# Altium integrated library Conectores.IntLib: 108 symbols
Pins are listed as number, name and electrical type; pins without a type are passive.

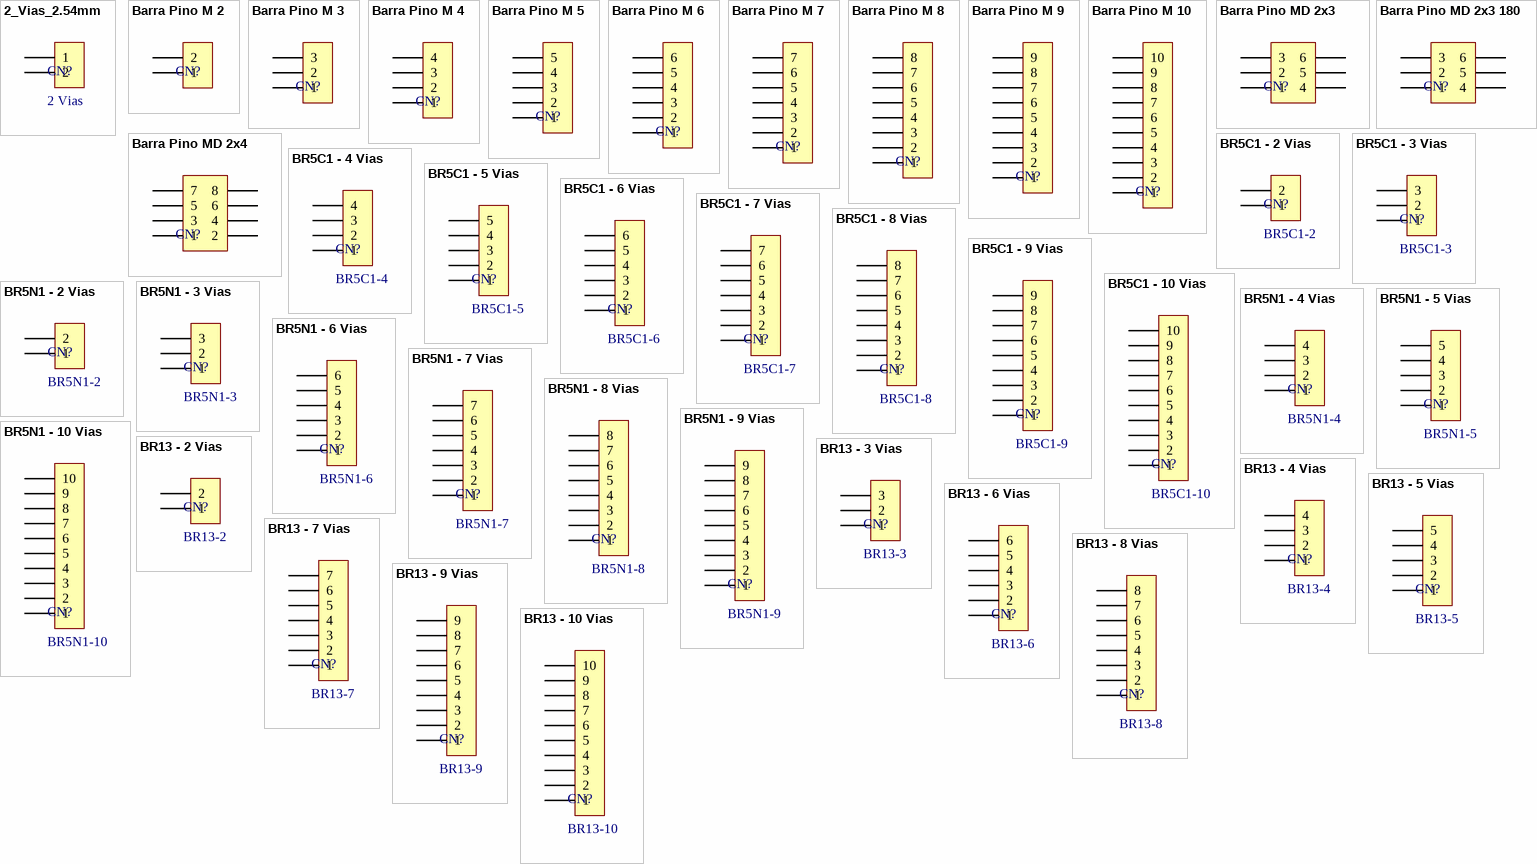
[diagram p0: symbols 2_Vias_2.54mm to BR13 - 10 Vias]

## 2_Vias_2.54mm
designator CN?, comment 2 Vias
Furos 2.54mm Pitch 1mm
footprint 2_Vias_2.54mm
pins: 1, 2

## Barra Pino M 2
designator CN?, comment Header-2  (value not drawn)
Barra Pino Macho 2 Vias 2.54mm
footprint Barra Pino M 2 (Barra Pinos Macho 2 Vias 2.54mm)
pins: 1, 2

## Barra Pino M 3
designator CN?, comment Header-3  (value not drawn)
Barra Pino Macho 3 Vias 2.54mm
footprint Barra Pino M 3 (Barra Pino Macho 3 Vias 2.54mm)
pins: 1, 2, 3

## Barra Pino M 4
designator CN?, comment Header-4  (value not drawn)
Barra Pino Macho 4 Vias 2.54mm
footprint Barra Pino M 4 (Barra Pinos Macho 4 Vias 2.54mm)
pins: 1, 2, 3, 4

## Barra Pino M 5
designator CN?, comment Header-5  (value not drawn)
Barra Pino Macho 5 Vias 2.54mm
footprint Barra Pino M 5 (Barra Pino Macho 5 Vias 2.54mm)
pins: 1, 2, 3, 4, 5

## Barra Pino M 6
designator CN?, comment Header-6  (value not drawn)
Barra Pino Macho 6 Vias 2.54mm
footprint Barra Pino M 6 (Barra Pino Macho 6 Vias 2.54mm)
footprint Barra Pino M 6 90
pins: 1, 2, 3, 4, 5, 6

## Barra Pino M 7
designator CN?, comment Header-7  (value not drawn)
Barra Pino Macho 8 Vias 2.54mm
footprint Barra Pino M 8 (Barra Pino Macho 8 Vias 2.54mm)
pins: 1, 2, 3, 4, 5, 6, 7

## Barra Pino M 8
designator CN?, comment Header-8  (value not drawn)
Barra Pino Macho 8 Vias 2.54mm
footprint Barra Pino M 8 (Barra Pino Macho 8 Vias 2.54mm)
pins: 1, 2, 3, 4, 5, 6, 7, 8

## Barra Pino M 9
designator CN?, comment Header-9  (value not drawn)
Barra Pino Macho 9 Vias 2.54mm
footprint Barra Pino M 10 (Barra Pino Macho 10 Vias 2.54mm)
pins: 1, 2, 3, 4, 5, 6, 7, 8, 9

## Barra Pino M 10
designator CN?, comment Header-10  (value not drawn)
Barra Pino Macho 10 Vias 2.54mm
footprint Barra Pino M 10 (Barra Pino Macho 10 Vias 2.54mm)
pins: 1, 2, 3, 4, 5, 6, 7, 8, 9, 10

## Barra Pino MD 2x3
designator CN?, comment Barra Pinos M 2x3  (value not drawn)
Barra Pino Macho 6 Vias 2.54mm
footprint Barra Pino MD 2x3
pins: 1, 2, 3, 4, 5, 6

## Barra Pino MD 2x3 180
designator CN?, comment Barra Pinos M 2x3  (value not drawn)
Barra Pino Macho 6 Vias 2.54mm
footprint Barra Pino MD 2x3 180 (Barra Pino Macho 3 Vias 2.54mm)
pins: 1, 2, 3, 4, 5, 6

## Barra Pino MD 2x4
designator CN?, comment Barra Pinos M 2x4  (value not drawn)
Barra Pino Macho 8 Vias 2.54mm
footprint Barra Pino MD 2x4 (Barra Pinos Macho 4 Vias 2.54mm)
pins: 1, 2, 3, 4, 5, 6, 7, 8

## BR5C1 - 2 Vias
designator CN?, comment BR5C1-2
Borne de Pressão BR5C1-02 180º Metaltex; Datasheet: http://www.eletrodex.kinghost.net/Loja_Tray/Datasheets/Conectores/Bornes/BR.pdf
footprint BR5C1-02
pins: 1, 2

## BR5C1 - 3 Vias
designator CN?, comment BR5C1-3
Borne de Pressão BR5C1-03 180º Metaltex; Datasheet: http://www.eletrodex.kinghost.net/Loja_Tray/Datasheets/Conectores/Bornes/BR.pdf
footprint BR5C1-03
pins: 1, 2, 3

## BR5C1 - 4 Vias
designator CN?, comment BR5C1-4
Borne de Pressão BR5C1-04 180º Metaltex; Datasheet: http://www.eletrodex.kinghost.net/Loja_Tray/Datasheets/Conectores/Bornes/BR.pdf
footprint BR5C1-04
pins: 1, 2, 3, 4

## BR5C1 - 5 Vias
designator CN?, comment BR5C1-5
Borne de Pressão BR5C1-05 180º Metaltex; Datasheet: http://www.eletrodex.kinghost.net/Loja_Tray/Datasheets/Conectores/Bornes/BR.pdf
footprint BR5C1-05
pins: 1, 2, 3, 4, 5

## BR5C1 - 6 Vias
designator CN?, comment BR5C1-6
Borne de Pressão BR5C1-06 180º Metaltex; Datasheet: http://www.eletrodex.kinghost.net/Loja_Tray/Datasheets/Conectores/Bornes/BR.pdf
footprint BR5C1-06
pins: 1, 2, 3, 4, 5, 6

## BR5C1 - 7 Vias
designator CN?, comment BR5C1-7
Borne de Pressão BR5C1-07 180º Metaltex; Datasheet: http://www.eletrodex.kinghost.net/Loja_Tray/Datasheets/Conectores/Bornes/BR.pdf
footprint BR5C1-07
pins: 1, 2, 3, 4, 5, 6, 7

## BR5C1 - 8 Vias
designator CN?, comment BR5C1-8
Borne de Pressão BR5C1-08 180º Metaltex; Datasheet: http://www.eletrodex.kinghost.net/Loja_Tray/Datasheets/Conectores/Bornes/BR.pdf
footprint BR5C1-08
pins: 1, 2, 3, 4, 5, 6, 7, 8

## BR5C1 - 9 Vias
designator CN?, comment BR5C1-9
Borne de Pressão BR5C1-09 180º Metaltex; Datasheet: http://www.eletrodex.kinghost.net/Loja_Tray/Datasheets/Conectores/Bornes/BR.pdf
footprint BR5C1-09
pins: 1, 2, 3, 4, 5, 6, 7, 8, 9

## BR5C1 - 10 Vias
designator CN?, comment BR5C1-10
Borne de Pressão BR5C1-10 180º Metaltex; Datasheet: http://www.eletrodex.kinghost.net/Loja_Tray/Datasheets/Conectores/Bornes/BR.pdf
footprint BR5C1-10
pins: 1, 2, 3, 4, 5, 6, 7, 8, 9, 10

## BR5N1 - 2 Vias
designator CN?, comment BR5N1-2
Borne de Pressão BR5N1-02 90º Metaltex; Datasheet: http://www.eletrodex.kinghost.net/Loja_Tray/Datasheets/Conectores/Bornes/BR.pdf
footprint BR5N1-02
pins: 1, 2

## BR5N1 - 3 Vias
designator CN?, comment BR5N1-3
Borne de Pressão BR5N1-03 90º Metaltex; Datasheet: http://www.eletrodex.kinghost.net/Loja_Tray/Datasheets/Conectores/Bornes/BR.pdf
footprint BR5N1-03
pins: 1, 2, 3

## BR5N1 - 4 Vias
designator CN?, comment BR5N1-4
Borne de Pressão BR5N1-04 90º Metaltex; Datasheet: http://www.eletrodex.kinghost.net/Loja_Tray/Datasheets/Conectores/Bornes/BR.pdf
footprint BR5N1-04
pins: 1, 2, 3, 4

## BR5N1 - 5 Vias
designator CN?, comment BR5N1-5
Borne de Pressão BR5N1-05 90º Metaltex; Datasheet: http://www.eletrodex.kinghost.net/Loja_Tray/Datasheets/Conectores/Bornes/BR.pdf
footprint BR5N1-05
pins: 1, 2, 3, 4, 5

## BR5N1 - 6 Vias
designator CN?, comment BR5N1-6
Borne de Pressão BR5N1-06 90º Metaltex; Datasheet: http://www.eletrodex.kinghost.net/Loja_Tray/Datasheets/Conectores/Bornes/BR.pdf
footprint BR5N1-06
pins: 1, 2, 3, 4, 5, 6

## BR5N1 - 7 Vias
designator CN?, comment BR5N1-7
Borne de Pressão BR5N1-07 90º Metaltex; Datasheet: http://www.eletrodex.kinghost.net/Loja_Tray/Datasheets/Conectores/Bornes/BR.pdf
footprint BR5N1-07
pins: 1, 2, 3, 4, 5, 6, 7

## BR5N1 - 8 Vias
designator CN?, comment BR5N1-8
Borne de Pressão BR5N1-08 90º Metaltex; Datasheet: http://www.eletrodex.kinghost.net/Loja_Tray/Datasheets/Conectores/Bornes/BR.pdf
footprint BR5N1-08
pins: 1, 2, 3, 4, 5, 6, 7, 8

## BR5N1 - 9 Vias
designator CN?, comment BR5N1-9
Borne de Pressão BR5N1-09 90º Metaltex; Datasheet: http://www.eletrodex.kinghost.net/Loja_Tray/Datasheets/Conectores/Bornes/BR.pdf
footprint BR5N1-09
pins: 1, 2, 3, 4, 5, 6, 7, 8, 9

## BR5N1 - 10 Vias
designator CN?, comment BR5N1-10
Borne de Pressão BR5N1-10 90º Metaltex; Datasheet: http://www.eletrodex.kinghost.net/Loja_Tray/Datasheets/Conectores/Bornes/BR.pdf
footprint BR5N1-10
pins: 1, 2, 3, 4, 5, 6, 7, 8, 9, 10

## BR13 - 2 Vias
designator CN?, comment BR13-2
Borne de Mola Metaltex - Passo 3.5mm; Datasheet: http://www.eletrodex.kinghost.net/Loja_Tray/Datasheets/Conectores/Bornes/BR.pdf
footprint BR13-2
pins: 1, 2

## BR13 - 3 Vias
designator CN?, comment BR13-3
Borne de Mola Metaltex - Passo 3.5mm; Datasheet: http://www.eletrodex.kinghost.net/Loja_Tray/Datasheets/Conectores/Bornes/BR.pdf
footprint BR13-3
pins: 1, 2, 3

## BR13 - 4 Vias
designator CN?, comment BR13-4
Borne de Mola Metaltex - Passo 3.5mm; Datasheet: http://www.eletrodex.kinghost.net/Loja_Tray/Datasheets/Conectores/Bornes/BR.pdf
footprint BR13-4
pins: 1, 2, 3, 4

## BR13 - 5 Vias
designator CN?, comment BR13-5
Borne de Mola Metaltex - Passo 3.5mm; Datasheet: http://www.eletrodex.kinghost.net/Loja_Tray/Datasheets/Conectores/Bornes/BR.pdf
footprint BR13-5
pins: 1, 2, 3, 4, 5

## BR13 - 6 Vias
designator CN?, comment BR13-6
Borne de Mola Metaltex - Passo 3.5mm; Datasheet: http://www.eletrodex.kinghost.net/Loja_Tray/Datasheets/Conectores/Bornes/BR.pdf
footprint BR13-6
pins: 1, 2, 3, 4, 5, 6

## BR13 - 7 Vias
designator CN?, comment BR13-7
Borne de Mola Metaltex - Passo 3.5mm; Datasheet: http://www.eletrodex.kinghost.net/Loja_Tray/Datasheets/Conectores/Bornes/BR.pdf
footprint BR13-7
pins: 1, 2, 3, 4, 5, 6, 7

## BR13 - 8 Vias
designator CN?, comment BR13-8
Borne de Mola Metaltex - Passo 3.5mm; Datasheet: http://www.eletrodex.kinghost.net/Loja_Tray/Datasheets/Conectores/Bornes/BR.pdf
footprint BR13-8
pins: 1, 2, 3, 4, 5, 6, 7, 8

## BR13 - 9 Vias
designator CN?, comment BR13-9
Borne de Mola Metaltex - Passo 3.5mm; Datasheet: http://www.eletrodex.kinghost.net/Loja_Tray/Datasheets/Conectores/Bornes/BR.pdf
footprint BR13-9
pins: 1, 2, 3, 4, 5, 6, 7, 8, 9

## BR13 - 10 Vias
designator CN?, comment BR13-10
Borne de Mola Metaltex - Passo 3.5mm; Datasheet: http://www.eletrodex.kinghost.net/Loja_Tray/Datasheets/Conectores/Bornes/BR.pdf
footprint BR13-10
pins: 1, 2, 3, 4, 5, 6, 7, 8, 9, 10

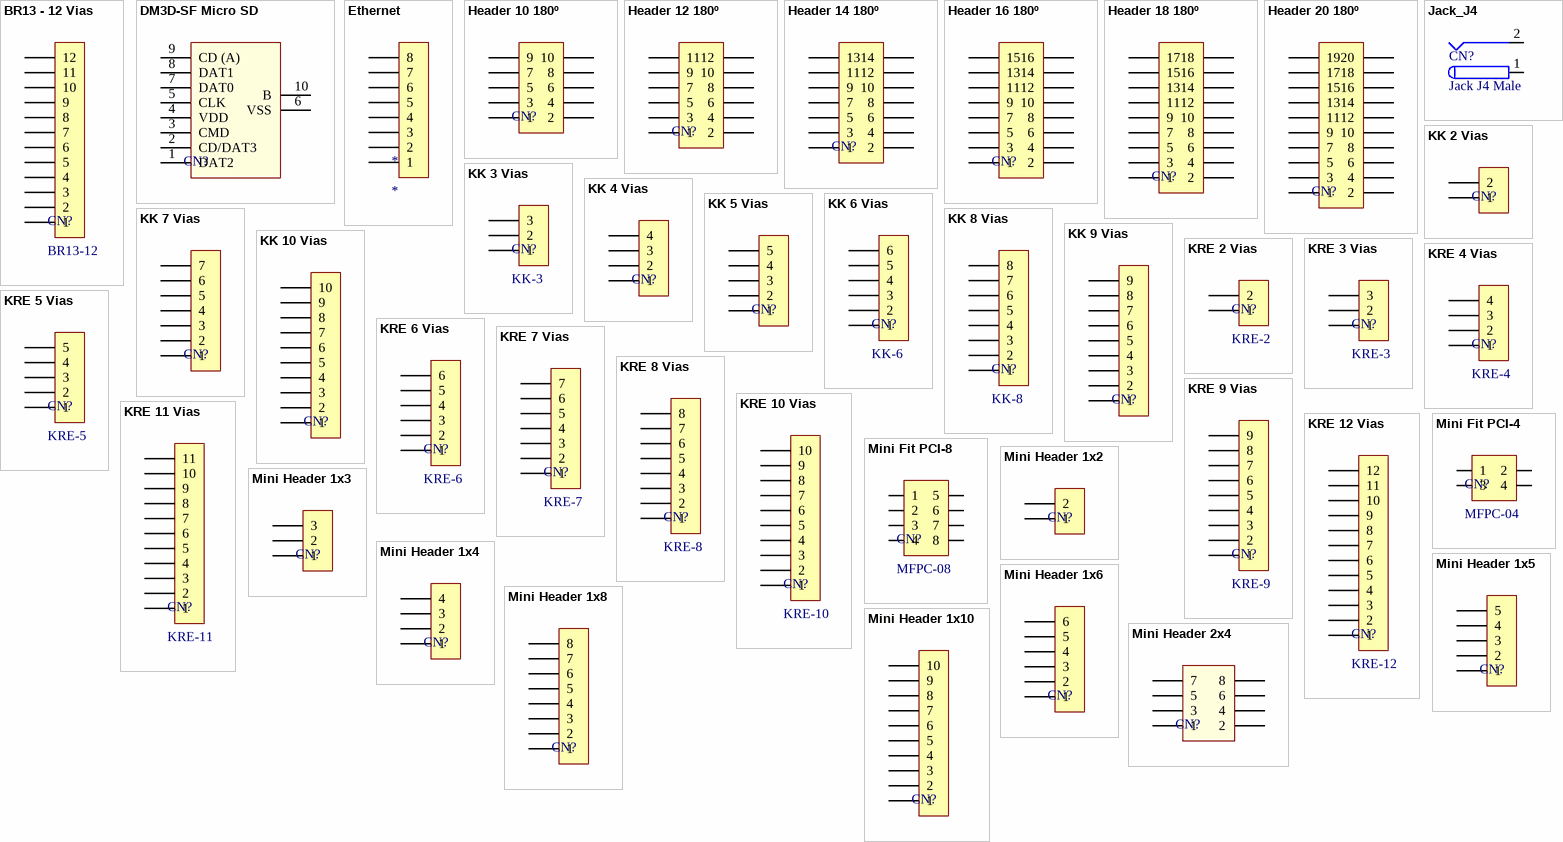
[diagram p1: symbols BR13 - 12 Vias to Mini Header 2x4]

## BR13 - 12 Vias
designator CN?, comment BR13-12
Borne de Mola Metaltex - Passo 3.5mm; Datasheet: http://www.eletrodex.kinghost.net/Loja_Tray/Datasheets/Conectores/Bornes/BR.pdf
footprint BR13-12
pins: 1, 2, 3, 4, 5, 6, 7, 8, 9, 10, 11, 12

## DM3D-SF Micro SD
designator CN?, comment DM3D-SF  (value not drawn)
Conector Micro SD Card
footprint DM3D-SF
pins: 1 DAT2, 2 CD/DAT3, 3 CMD, 4 VDD, 5 CLK, 6 VSS, 7 DAT0, 8 DAT1, 9 CD (A), 10 B

## Ethernet
designator *
pins: 1, 2, 3, 4, 5, 6, 7, 8

## Header 10 180º
designator CN?, comment Header 10 Vias  (value not drawn)
Conector Placa Macho 12 Vias C/ guia 180º 2.54mm
footprint Header 10 180º PCI
pins: 1, 2, 3, 4, 5, 6, 7, 8, 9, 10

## Header 12 180º
designator CN?, comment Header 12 Vias  (value not drawn)
Conector Placa Macho 12 Vias C/ guia 180º 2.54mm
footprint Header 12 180º PCI
pins: 1, 2, 3, 4, 5, 6, 7, 8, 9, 10, 11, 12

## Header 14 180º
designator CN?, comment Header 14 Vias  (value not drawn)
Conector Placa Macho 14 Vias C/ guia 180º 2.54mm
footprint Header 14 180º PCI
pins: 1, 2, 3, 4, 5, 6, 7, 8, 9, 10, 11, 12, 13, 14

## Header 16 180º
designator CN?, comment Header 16 Vias  (value not drawn)
Conector Placa Macho 16 Vias C/ guia 180º 2.54mm
footprint Header 16 180º PCI
pins: 1, 2, 3, 4, 5, 6, 7, 8, 9, 10, 11, 12, 13, 14, 15, 16

## Header 18 180º
designator CN?, comment Header 18 Vias  (value not drawn)
Conector Placa Macho 18 Vias C/ guia 180º 2.54mm
footprint Header 18 180º PCI
pins: 1, 2, 3, 4, 5, 6, 7, 8, 9, 10, 11, 12, 13, 14, 15, 16, 17, 18

## Header 20 180º
designator CN?, comment Header 20 Vias  (value not drawn)
Conector Placa Macho 20 Vias C/ guia 180º 2.54mm
footprint Header 20 180º PCI
pins: 1, 2, 3, 4, 5, 6, 7, 8, 9, 10, 11, 12, 13, 14, 15, 16, 17, 18, 19, 20

## Jack_J4
designator CN?, comment Jack J4 Male
Conector Plug Jack J4 (padrao arduino)
footprint Jack J4
pins: 1 (power), 2 (power)

## KK 2 Vias
designator CN?, comment KK-2  (value not drawn)
Conector Placa KK 2 Vias 2.54mm
footprint KK_2W_.100
pins: 1, 2

## KK 3 Vias
designator CN?, comment KK-3
Conector Placa KK 3 Vias 2.54mm
footprint KK_3W_.100
pins: 1, 2, 3

## KK 4 Vias
designator CN?, comment KK-4  (value not drawn)
Conector Placa KK 4 Vias 2.54mm
footprint KK_4W_.100
pins: 1, 2, 3, 4

## KK 5 Vias
designator CN?, comment KK-5  (value not drawn)
Conector Placa KK 5 Vias 2.54mm
footprint KK_5W_.100
pins: 1, 2, 3, 4, 5

## KK 6 Vias
designator CN?, comment KK-6
Conector Placa KK 6 Vias 2.54mm
footprint KK_6W_.100
pins: 1, 2, 3, 4, 5, 6

## KK 7 Vias
designator CN?, comment KK-7  (value not drawn)
Conector Placa KK 7 Vias 2.54mm
footprint KK_7W_.100
pins: 1, 2, 3, 4, 5, 6, 7

## KK 8 Vias
designator CN?, comment KK-8
Conector Placa KK 8 Vias 2.54mm
footprint KK_8W_.100
pins: 1, 2, 3, 4, 5, 6, 7, 8

## KK 9 Vias
designator CN?, comment KK-9  (value not drawn)
Conector Placa KK 9 Vias 2.54mm
footprint KK_9W_.100
pins: 1, 2, 3, 4, 5, 6, 7, 8, 9

## KK 10 Vias
designator CN?, comment KK-10  (value not drawn)
Conector Placa KK 10 Vias 2.54mm
footprint KK_10W_.100
pins: 1, 2, 3, 4, 5, 6, 7, 8, 9, 10

## KRE 2 Vias
designator CN?, comment KRE-2
BR4 - BORNE KRE METALTEX 14MM VERDE; Datasheet: http://www.eletrodex.kinghost.net/Loja_Tray/Datasheets/Conectores/Bornes/BR.pdf
footprint KRE 2 Vias 5mm (Terminal Block 2 Pos. 5.08mm Pitch)
pins: 1, 2

## KRE 3 Vias
designator CN?, comment KRE-3
BR4 - BORNE KRE METALTEX 14MM VERDE; Datasheet: http://www.eletrodex.kinghost.net/Loja_Tray/Datasheets/Conectores/Bornes/BR.pdf
footprint KRE 3 Vias 5mm (Terminal Block 3 Pos. 5mm Pitch)
pins: 1, 2, 3

## KRE 4 Vias
designator CN?, comment KRE-4
BR4 - BORNE KRE METALTEX 14MM VERDE; Datasheet: http://www.eletrodex.kinghost.net/Loja_Tray/Datasheets/Conectores/Bornes/BR.pdf
footprint KRE 4 Vias 5mm (Terminal Block 4 Pos. 5mm Pitch)
pins: 1, 2, 3, 4

## KRE 5 Vias
designator CN?, comment KRE-5
BR4 - BORNE KRE METALTEX 14MM VERDE; Datasheet: http://www.eletrodex.kinghost.net/Loja_Tray/Datasheets/Conectores/Bornes/BR.pdf
footprint KRE 5 Vias 5mm (Terminal Block 5 Pos. 5mm Pitch)
pins: 1, 2, 3, 4, 5

## KRE 6 Vias
designator CN?, comment KRE-6
BR4 - BORNE KRE METALTEX 14MM VERDE; Datasheet: http://www.eletrodex.kinghost.net/Loja_Tray/Datasheets/Conectores/Bornes/BR.pdf
footprint KRE 6 Vias 5mm (Terminal Block 6 Pos. 5mm Pitch)
pins: 1, 2, 3, 4, 5, 6

## KRE 7 Vias
designator CN?, comment KRE-7
BR4 - BORNE KRE METALTEX 14MM VERDE; Datasheet: http://www.eletrodex.kinghost.net/Loja_Tray/Datasheets/Conectores/Bornes/BR.pdf
footprint KRE 7 Vias 5mm (Terminal Block 7 Pos. 5mm Pitch)
pins: 1, 2, 3, 4, 5, 6, 7

## KRE 8 Vias
designator CN?, comment KRE-8
BR4 - BORNE KRE METALTEX 14MM VERDE; Datasheet: http://www.eletrodex.kinghost.net/Loja_Tray/Datasheets/Conectores/Bornes/BR.pdf
footprint KRE 8 Vias 5mm (Terminal Block 8 Pos. 5mm Pitch)
pins: 1, 2, 3, 4, 5, 6, 7, 8

## KRE 9 Vias
designator CN?, comment KRE-9
BR4 - BORNE KRE METALTEX 14MM VERDE; Datasheet: http://www.eletrodex.kinghost.net/Loja_Tray/Datasheets/Conectores/Bornes/BR.pdf
footprint KRE 9 Vias 5mm (Terminal Block 9 Pos. 5mm Pitch)
pins: 1, 2, 3, 4, 5, 6, 7, 8, 9

## KRE 10 Vias
designator CN?, comment KRE-10
BR4 - BORNE KRE METALTEX 14MM VERDE; Datasheet: http://www.eletrodex.kinghost.net/Loja_Tray/Datasheets/Conectores/Bornes/BR.pdf
footprint KRE 10 Vias 5mm (Terminal Block 10 Pos. 5mm Pitch)
pins: 1, 2, 3, 4, 5, 6, 7, 8, 9, 10

## KRE 11 Vias
designator CN?, comment KRE-11
BR4 - BORNE KRE METALTEX 14MM VERDE; Datasheet: http://www.eletrodex.kinghost.net/Loja_Tray/Datasheets/Conectores/Bornes/BR.pdf
footprint KRE 11 Vias 5mm (Terminal Block 11 Pos. 5mm Pitch)
pins: 1, 2, 3, 4, 5, 6, 7, 8, 9, 10, 11

## KRE 12 Vias
designator CN?, comment KRE-12
BR4 - BORNE KRE METALTEX 14MM VERDE; Datasheet: http://www.eletrodex.kinghost.net/Loja_Tray/Datasheets/Conectores/Bornes/BR.pdf
footprint KRE 12 Vias 5mm (Terminal Block 12 Pos. 5mm Pitch)
pins: 1, 2, 3, 4, 5, 6, 7, 8, 9, 10, 11, 12

## Mini Fit PCI-4
designator CN?, comment MFPC-04
Conector Macho para PCI 4 vias 4.2mm
footprint MFPC-04
pins: 1, 2, 3, 4

## Mini Fit PCI-8
designator CN?, comment MFPC-08
Conector Macho para PCI 8 vias 4.2mm
footprint MFPC-08
pins: 1, 2, 3, 4, 5, 6, 7, 8

## Mini Header 1x2
designator CN?  (value not drawn)
Barra Pino Femea 2 Vias 2.54mm; Partnumber: MCS-02
footprint Mini Header 1x2 (Barra Pinos Femea 2 Vias 2.54mm)
pins: 1, 2

## Mini Header 1x3
designator CN?  (value not drawn)
Barra Pino Femea 3 Vias 2.54mm; Partnumber: MCS-03
footprint Mini Header 1x3 (MCS-03)
pins: 1, 2, 3

## Mini Header 1x4
designator CN?  (value not drawn)
Barra Pino Femea 4 Vias 2.54mm; Partnumber: MCS-04
footprint Mini Header 1x4 (MCS-04)
pins: 1, 2, 3, 4

## Mini Header 1x5
designator CN?  (value not drawn)
Barra Pino Femea 5 Vias 2.54mm; Partnumber: MCS-05
footprint Mini Header 1x5 (MCS-05)
pins: 1, 2, 3, 4, 5

## Mini Header 1x6
designator CN?  (value not drawn)
Barra Pino Femea 6 Vias 2.54mm; Partnumber: MCS-06
footprint Mini Header 1x6 (MCS-06)
pins: 1, 2, 3, 4, 5, 6

## Mini Header 1x8
designator CN?  (value not drawn)
Barra Pino Femea 8 Vias 2.54mm; Partnumber: MCS-08
footprint Mini Header 1x8 (MCS-08)
pins: 1, 2, 3, 4, 5, 6, 7, 8

## Mini Header 1x10
designator CN?  (value not drawn)
Barra Pino Femea 10 Vias 2.54mm; Partnumber: MCS-10
footprint Mini Header 1x10 (MCS-10)
pins: 1, 2, 3, 4, 5, 6, 7, 8, 9, 10

## Mini Header 2x4
designator CN?  (value not drawn)
Barra Pino Femea 2x4 Vias 2.54mm; Partnumber: MCD-04
footprint Mini Header 2x4 (MCD-04)
pins: 1, 2, 3, 4, 5, 6, 7, 8

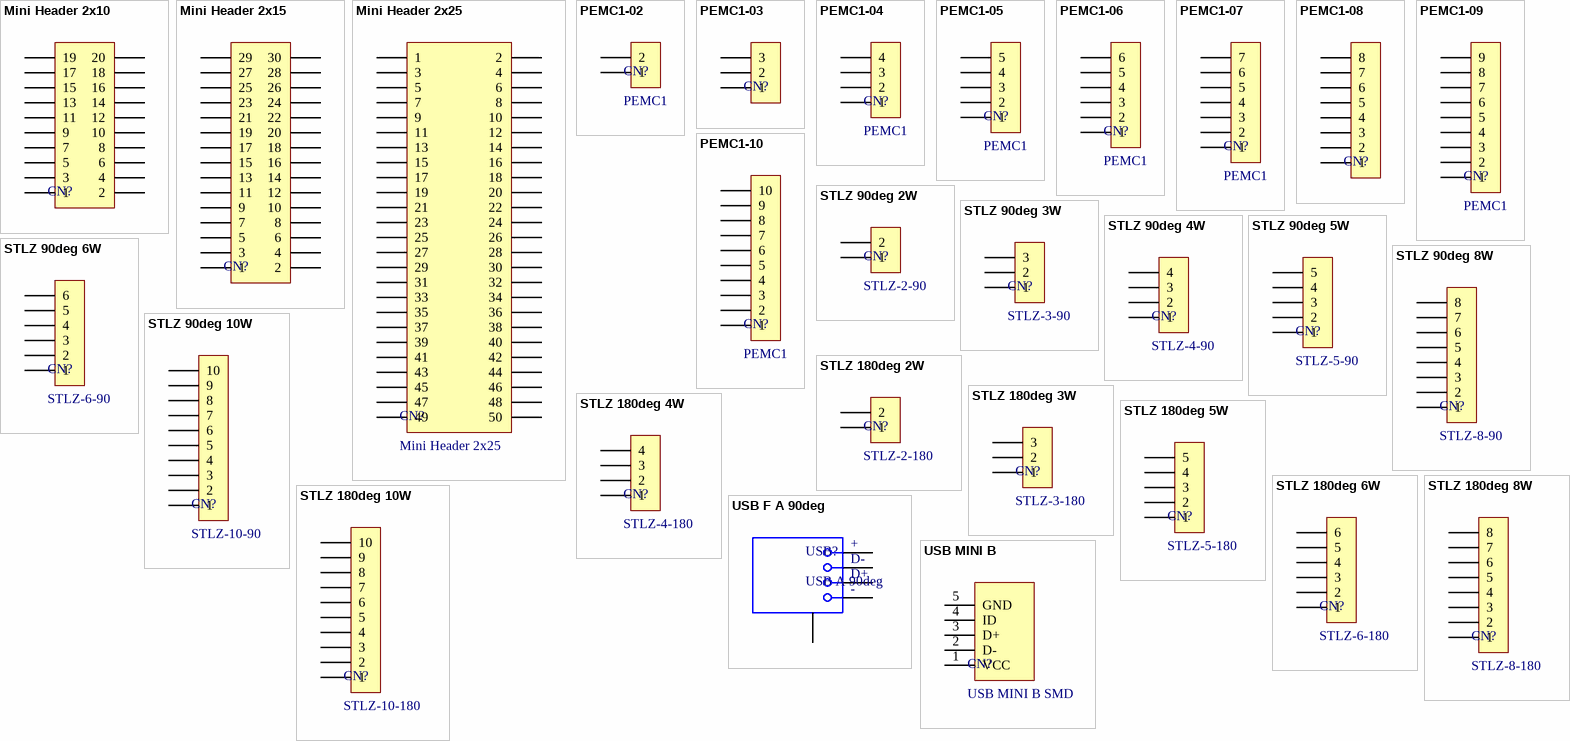
[diagram p2: symbols Mini Header 2x10 to USB MINI B]

## Mini Header 2x10
designator CN?  (value not drawn)
Barra Pino Femea 2x10 Vias 2.54mm; Partnumber: MCD-10
footprint Mini Header 2x10 (MCD-10)
pins: 1, 2, 3, 4, 5, 6, 7, 8, 9, 10, 11, 12, 13, 14, 15, 16, 17, 18, 19, 20

## Mini Header 2x15
designator CN?  (value not drawn)
Barra Pino Femea 2x15 Vias 2.54mm; Partnumber: MCD-15
footprint Mini Header 2x15 (MCD-15)
pins: 1, 2, 3, 4, 5, 6, 7, 8, 9, 10, 11, 12, 13, 14, 15, 16, 17, 18, 19, 20, 21, 22, 23, 24, 25, 26, 27, 28, 29, 30

## Mini Header 2x25
designator CN?
Mini Header Femea 2x25 Vias 2.54mm; Partnumber: MCD-25
footprint Mini Header 2X25 (MCD-25)
pins: 1, 2, 3, 4, 5, 6, 7, 8, 9, 10, 11, 12, 13, 14, 15, 16, 17, 18, 19, 20, 21, 22, 23, 24, 25, 26, 27, 28, 29, 30, 31, 32, 33, 34, 35, 36, 37, 38, 39, 40, 41, 42, 43, 44, 45, 46, 47, 48, 49, 50

## PEMC1-02
designator CN?, comment PEMC1
Conector Placa PEMC1 3 Vias passo 2.50mm; Datasheet: http://www.eletrodex.kinghost.net/Loja_Tray/Datasheets/Conectores/PCI/PE.pdf
footprint PEMC1-02
pins: 1, 2

## PEMC1-03
designator CN?, comment PEMC1  (value not drawn)
Conector Placa PEMC1 3 Vias passo 2.50mm; Datasheet: http://www.eletrodex.kinghost.net/Loja_Tray/Datasheets/Conectores/PCI/PE.pdf
footprint PEMC1-03
pins: 1, 2, 3

## PEMC1-04
designator CN?, comment PEMC1
Conector Placa PEMC1 4 Vias passo 2.50mm; Datasheet: http://www.eletrodex.kinghost.net/Loja_Tray/Datasheets/Conectores/PCI/PE.pdf
footprint PEMC1-04
pins: 1, 2, 3, 4

## PEMC1-05
designator CN?, comment PEMC1
Conector Placa PEMC1 5 Vias passo 2.50mm; Datasheet: http://www.eletrodex.kinghost.net/Loja_Tray/Datasheets/Conectores/PCI/PE.pdf
footprint PEMC1-05
pins: 1, 2, 3, 4, 5

## PEMC1-06
designator CN?, comment PEMC1
Conector Placa PEMC1 6 Vias passo 2.50mm; Datasheet: http://www.eletrodex.kinghost.net/Loja_Tray/Datasheets/Conectores/PCI/PE.pdf
footprint PEMC1-06
pins: 1, 2, 3, 4, 5, 6

## PEMC1-07
designator CN?, comment PEMC1
Conector Placa PEMC1 7 Vias passo 2.50mm; Datasheet: http://www.eletrodex.kinghost.net/Loja_Tray/Datasheets/Conectores/PCI/PE.pdf
footprint PEMC1-07
pins: 1, 2, 3, 4, 5, 6, 7

## PEMC1-08
designator CN?, comment PEMC1  (value not drawn)
Conector Placa PEMC1 8 Vias passo 2.50mm; Datasheet: http://www.eletrodex.kinghost.net/Loja_Tray/Datasheets/Conectores/PCI/PE.pdf
footprint PEMC1-08
pins: 1, 2, 3, 4, 5, 6, 7, 8

## PEMC1-09
designator CN?, comment PEMC1
Conector Placa PEMC1 9 Vias passo 2.50mm; Datasheet: http://www.eletrodex.kinghost.net/Loja_Tray/Datasheets/Conectores/PCI/PE.pdf
footprint PEMC1-09
pins: 1, 2, 3, 4, 5, 6, 7, 8, 9

## PEMC1-10
designator CN?, comment PEMC1
Conector Placa PEMC1 10 Vias passo 2.50mm; Datasheet: http://www.eletrodex.kinghost.net/Loja_Tray/Datasheets/Conectores/PCI/PE.pdf
footprint PEMC1-10
pins: 1, 2, 3, 4, 5, 6, 7, 8, 9, 10

## STLZ 90deg 2W
designator CN?, comment STLZ-2-90
Conector Socket STLZ 2 Vias 5.08mm 90deg; Partnumber: 1757242; Supplier Code: MSTBA 2,5/ 2-G-5,08; Supplier: https://www.digikey.com.br/pt/products/detail/phoenix-contact/1755736/260518
footprint STLZ 2 90deg 5.08mm (Socket STLZ 2 Pos. 5.08mm Pitch)
pins: 1, 2

## STLZ 90deg 3W
designator CN?, comment STLZ-3-90
Conector Socket STLZ 3 Vias 5.08mm 90deg; Partnumber: 1757255; Supplier Code: MSTBA 2,5/ 3-G-5,08; Supplier: https://www.digikey.com.br/pt/products/detail/phoenix-contact/1757255/260475?s=N4IgTCBcDaIIwHYCsCxKSAugXyA
footprint STLZ 3 90deg 5.08mm (Socket STLZ 3 Pos. 5.08mm Pitch)
pins: 1, 2, 3

## STLZ 90deg 4W
designator CN?, comment STLZ-4-90
Conector Socket STLZ 4 Vias 5.08mm 90deg; Partnumber: 1757268; Supplier Code: MSTBA 2,5/ 4-G-5,08; Supplier: https://www.digikey.com.br/pt/products/detail/phoenix-contact/1757268/260476
footprint STLZ 4 90deg 5.08mm (Socket STLZ 4 Pos. 5.08mm Pitch)
pins: 1, 2, 3, 4

## STLZ 90deg 5W
designator CN?, comment STLZ-5-90
Conector Socket STLZ 5 Vias 5.08mm 90deg; Partnumber: 1757271; Supplier Code: MSTBA 2,5/ 5-G-5,08; Supplier: https://www.digikey.com.br/pt/products/detail/phoenix-contact/1757271/260477?s=N4IgTCBcDaIIwHYCsCwLiAugXyA
footprint STLZ 5 90deg 5.08mm (Socket STLZ 5 Pos. 5.08mm Pitch)
pins: 1, 2, 3, 4, 5

## STLZ 90deg 6W
designator CN?, comment STLZ-6-90
Conector Socket STLZ 6 Vias 5.08mm 90deg; Partnumber: 1757284; Supplier Code: MSTBA 2,5/ 6-G-5,08; Supplier: https://www.digikey.com.br/pt/products/detail/phoenix-contact/1757284/260478?s=N4IgTCBcDaIIwHYCsCwA4AsIC6BfIA
footprint STLZ 6 90deg 5.08mm (Socket STLZ 6 Pos. 5.08mm Pitch)
pins: 1, 2, 3, 4, 5, 6

## STLZ 90deg 8W
designator CN?, comment STLZ-8-90
Conector Socket STLZ 8 Vias 5.08mm 90deg; Partnumber: 1757307; Supplier Code: MSTBA 2,5/ 8-G-5,08; Supplier: https://www.digikey.com.br/pt/products/detail/phoenix-contact/1757307/260480?s=N4IgTCBcDaIIwHYCsCDMAGBIC6BfIA
footprint STLZ 8 90deg 5.08mm (Socket STLZ 8 Pos. 5.08mm Pitch)
pins: 1, 2, 3, 4, 5, 6, 7, 8

## STLZ 90deg 10W
designator CN?, comment STLZ-10-90
Conector Socket STLZ 10 Vias 5.08mm 90deg; Partnumber: 1757323; Supplier Code: MSTBA 2,5/ 10-G-5,08; Supplier: https://www.digikey.com.br/pt/products/detail/phoenix-contact/1757323/260482?s=N4IgTCBcDaIIwHYCsCDMZUgLoF8g
footprint STLZ 10 90deg 5.08mm (Socket STLZ 10 Pos. 5.08mm Pitch)
pins: 1, 2, 3, 4, 5, 6, 7, 8, 9, 10

## STLZ 180deg 2W
designator CN?, comment STLZ-2-180
Conector Socket STLZ 2 Vias 5.08mm 180deg; Partnumber: 1755736; Supplier Code: MSTBVA 2,5/ 2-G-5,08; Supplier: https://www.digikey.com.br/pt/products/detail/phoenix-contact/1755736/260518
footprint STLZ 2 180deg 5.08mm (Socket STLZ 2 Pos. 5.08mm Pitch)
pins: 1, 2

## STLZ 180deg 3W
designator CN?, comment STLZ-3-180
Conector Socket STLZ 3 Vias 5.08mm 180deg; Partnumber: 1755749; Supplier Code: MSTBVA 2,5/ 3-G-5,08; Supplier: https://www.digikey.com.br/pt/products/detail/phoenix-contact/1755749/260519?s=N4IgTCBcDaIIwHYCsSEBYCcIC6BfIA
footprint STLZ 3 180deg 5.08mm (Socket STLZ 3 Pos. 5.08mm Pitch)
pins: 1, 2, 3

## STLZ 180deg 4W
designator CN?, comment STLZ-4-180
Conector Socket STLZ 4 Vias 5.08mm 180deg; Partnumber: 1755752; Supplier Code: MSTBVA 2,5/ 4-G-5,08; Supplier: https://www.digikey.com.br/pt/products/detail/phoenix-contact/1755752/260520
footprint STLZ 4 180deg 5.08mm (Socket STLZ 4 Pos. 5.08mm Pitch)
pins: 1, 2, 3, 4

## STLZ 180deg 5W
designator CN?, comment STLZ-5-180
Conector Socket STLZ 5 Vias 5.08mm 180deg; Partnumber: 1755765; Supplier Code: MSTBVA 2,5/ 5-G-5,08; Supplier: https://www.digikey.com.br/pt/products/detail/phoenix-contact/1755765/260521?s=N4IgTCBcDaIIwHYCsSEDYkgLoF8g
footprint STLZ 5 180deg 5.08mm (Socket STLZ 5 Pos. 5.08mm Pitch)
pins: 1, 2, 3, 4, 5

## STLZ 180deg 6W
designator CN?, comment STLZ-6-180
Conector Socket STLZ 6 Vias 5.08mm 180deg; Partnumber: 1755778; Supplier Code: MSTBVA 2,5/ 6-G-5,08; Supplier: https://www.digikey.com.br/pt/products/detail/phoenix-contact/1755778/260522?s=N4IgTCBcDaIIwHYCsSEIBwgLoF8g
footprint STLZ 6 180deg 5.08mm (Socket STLZ 6 Pos. 5.08mm Pitch)
pins: 1, 2, 3, 4, 5, 6

## STLZ 180deg 8W
designator CN?, comment STLZ-8-180
Conector Socket STLZ 8 Vias 5.08mm 180deg; Partnumber: 1755794; Supplier Code: MSTBVA 2,5/ 8-G-5,08; Supplier: https://www.digikey.com.br/pt/products/detail/phoenix-contact/1755794/260524?s=N4IgTCBcDaIIwHYCsSEE4AsIC6BfIA
footprint STLZ 8 180deg 5.08mm (Socket STLZ 8 Pos. 5.08mm Pitch)
pins: 1, 2, 3, 4, 5, 6, 7, 8

## STLZ 180deg 10W
designator CN?, comment STLZ-10-180
Conector Socket STLZ 10 Vias 5.08mm 180deg; Partnumber: 1755817; Supplier Code: MSTBVA 2,5/ 10-G-5,08; Supplier: https://www.digikey.com.br/pt/products/detail/phoenix-contact/1755817/260526
footprint STLZ 10 180deg 5.08mm (Socket STLZ 10 Pos. 5.08mm Pitch)
pins: 1, 2, 3, 4, 5, 6, 7, 8, 9, 10

## USB F A 90deg
designator USB?, comment USB A 90deg
footprint USB A 90
pins: 1 +, 2 D-, 3 D+, 4 -, 5

## USB MINI B
designator CN?, comment USB MINI B SMD
Conector USB Mini B SMD
footprint USB MINI B
pins: 1 VCC, 2 D-, 3 D+, 4 ID, 5 GND